# Altium footprint library JLC.PcbLib: 10 footprints
Each footprint in its own frame and in the unit in brackets; x right, y up, seen from the top. Pads: shape width x height; smd on the part's side, far side on the other; paste and mask are expansions set on the pad; w line width, h text height; cw(c..) or ccw(c..) is an arc to the next point about the centre after c.
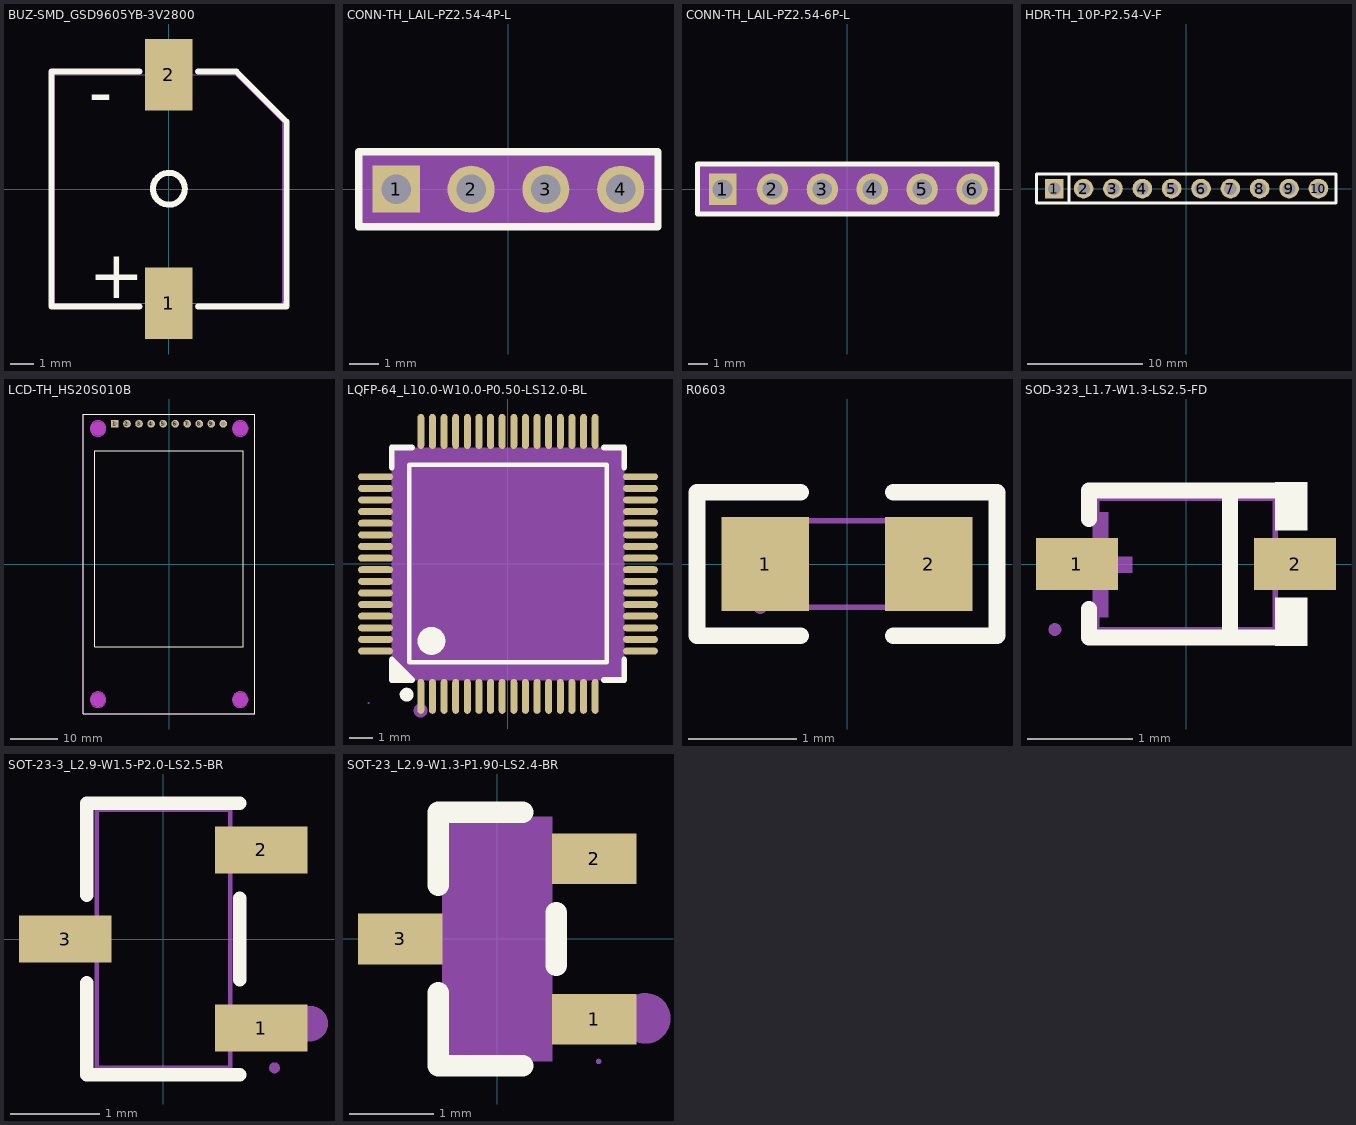
[diagram p0: the footprints below, top view; thin cyan lines are the x and y axes]

## BUZ-SMD_GSD9605YB-3V2800 [mm]
pads (2):
  rect 2x3 smd: 1(0,-4.8) 2(0,4.8)
Top Overlay:
  circle w0.254: c0.01,0.01 r0.669
  lines w0.254: -4.92,4.91 -4.92,-4.94 -1.231,-4.94 ; -4.91,4.93 -1.231,4.93 ; 1.231,-4.94 4.95,-4.94 4.95,2.83 2.85,4.93 1.231,4.93
  text "+" at -3.36,-4.59 h2.03
  text "-" at -3.36,3.08 h2.03
Mechanical 2:
  region: -0.915,-4.705 0.895,-4.705 0.895,-4.875 -0.915,-4.875
  region: -0.095,-5.715 -0.095,-3.905 0.075,-3.905 0.075,-5.715
  region: -0.915,4.895 0.895,4.895 0.895,4.725 -0.915,4.725
Mechanical 6:
  lines w0.051: -4.8,-4.8 -4.8,4.8 2.8,4.8 4.8,2.8 4.8,-4.8 -4.8,-4.8
Mechanical 8:
  region: 4.86,-4.8 4.86,-4.805 4.859,-4.814 4.856,-4.823 4.851,-4.832 4.846,-4.839 4.839,-4.846 4.832,-4.851 4.823,-4.856 4.814,-4.859 4.805,-4.86 4.795,-4.86 4.786,-4.859 4.777,-4.856 4.769,-4.851 4.761,-4.846 4.754,-4.839 4.749,-4.832 4.745,-4.823 4.742,-4.814 4.74,-4.805 4.74,-4.8 4.74,-4.795 4.742,-4.786 4.745,-4.777 4.749,-4.769 4.754,-4.761 4.761,-4.754 4.769,-4.749 4.777,-4.745 4.786,-4.742 4.795,-4.74 4.805,-4.74 4.814,-4.742 4.823,-4.745 4.832,-4.749 4.839,-4.754 4.846,-4.761 4.851,-4.769 4.856,-4.777 4.859,-4.786 4.86,-4.795 4.86,-4.8
Mechanical 9:
  region: -0.75,-5.15 -0.75,-3.65 0.75,-3.65 0.75,-5.15
  region: 0.75,5.15 0.75,3.65 -0.75,3.65 -0.75,5.15

## CONN-TH_LAIL-PZ2.54-4P-L [mm]
pads (4):
  rect 1.6x1.6 hole 1 paste-2539.97 mask+0.051: 1(-3.81,0)
  round 1.6 hole 1 paste-2539.97 mask+0.051: 2(-1.27,0) 3(1.27,0) 4(3.81,0)
Top Overlay:
  lines w0.254: -5.08,-1.27 -5.08,1.27 5.08,1.27 5.08,-1.27 -5.08,-1.27
Mechanical 9:
  region: -5.08,-1.25 -5.08,1.25 5.08,1.25 5.08,-1.25
Mechanical 11:
  region: -5.05,1.25 -5.05,1.247 -5.051,1.241 -5.053,1.236 -5.057,1.231 -5.061,1.227 -5.066,1.223 -5.071,1.221 -5.077,1.22 -5.083,1.22 -5.089,1.221 -5.094,1.223 -5.099,1.227 -5.103,1.231 -5.106,1.236 -5.109,1.241 -5.11,1.247 -5.11,1.25 -5.11,1.253 -5.109,1.259 -5.106,1.264 -5.103,1.269 -5.099,1.273 -5.094,1.277 -5.089,1.279 -5.083,1.28 -5.077,1.28 -5.071,1.279 -5.066,1.277 -5.061,1.273 -5.057,1.269 -5.053,1.264 -5.051,1.259 -5.05,1.253 -5.05,1.25
Mechanical 12:
  region: 3.49,0.32 4.13,0.32 4.13,-0.32 3.49,-0.32
  region: 0.95,0.32 1.59,0.32 1.59,-0.32 0.95,-0.32
  region: -1.59,0.32 -0.95,0.32 -0.95,-0.32 -1.59,-0.32
  region: -4.13,0.32 -3.49,0.32 -3.49,-0.32 -4.13,-0.32

## CONN-TH_LAIL-PZ2.54-6P-L [mm]
pads (6):
  rect 1.4x1.6 hole 1 paste-2539.97 mask+0.05: 1(-6.35,0)
  round 1.6 hole 1 paste-2539.97 mask+0.05: 2(-3.81,0) 3(-1.27,0) 4(1.27,0) 5(3.81,0) 6(6.35,0)
Top Overlay:
  lines w0.254: -7.62,-1.27 7.62,-1.27 7.62,1.27 -7.62,1.27 -7.62,-1.27
Mechanical 9:
  region: -7.62,-1.25 -7.62,1.25 7.62,1.25 7.62,-1.25
Mechanical 11:
  region: -7.59,1.25 -7.599,1.271 -7.62,1.28 -7.641,1.271 -7.65,1.25 -7.641,1.229 -7.62,1.22 -7.599,1.229
Mechanical 12:
  region: 6.03,0.32 6.67,0.32 6.67,-0.32 6.03,-0.32
  region: 3.49,0.32 4.13,0.32 4.13,-0.32 3.49,-0.32
  region: 0.95,0.32 1.59,0.32 1.59,-0.32 0.95,-0.32
  region: -1.59,0.32 -0.95,0.32 -0.95,-0.32 -1.59,-0.32
  region: -4.13,0.32 -3.49,0.32 -3.49,-0.32 -4.13,-0.32
  region: -6.67,0.32 -6.03,0.32 -6.03,-0.32 -6.67,-0.32

## HDR-TH_10P-P2.54-V-F [mm]
pads (10):
  rect 1.575x1.7 hole 1.1: 1(-11.43,0)
  round 1.7 hole 1.1: 2(-8.89,0) 3(-6.35,0) 4(-3.81,0) 5(-1.27,0) 6(1.27,0) 7(3.81,0) 8(6.35,0) 9(8.89,0) 10(11.43,0)
Top Overlay:
  lines w0.254: -10.16,-1.25 -10.16,1.25 ; -12.95,-1.25 12.95,-1.25 12.95,1.25 -12.95,1.25 -12.95,-1.25
Mechanical 6:
  lines w0.051: -12.95,-1.25 -12.95,1.25 12.95,1.25 12.95,-1.25 -12.95,-1.25
Mechanical 8:
  region: -12.89,-1.25 -12.89,-1.255 -12.891,-1.264 -12.894,-1.273 -12.899,-1.281 -12.904,-1.289 -12.911,-1.296 -12.919,-1.301 -12.927,-1.306 -12.936,-1.309 -12.945,-1.31 -12.955,-1.31 -12.964,-1.309 -12.973,-1.306 -12.981,-1.301 -12.989,-1.296 -12.996,-1.289 -13.001,-1.281 -13.006,-1.273 -13.008,-1.264 -13.01,-1.255 -13.01,-1.25 -13.01,-1.245 -13.008,-1.236 -13.006,-1.227 -13.001,-1.219 -12.996,-1.211 -12.989,-1.204 -12.981,-1.199 -12.973,-1.194 -12.964,-1.191 -12.955,-1.19 -12.945,-1.19 -12.936,-1.191 -12.927,-1.194 -12.919,-1.199 -12.911,-1.204 -12.904,-1.211 -12.899,-1.219 -12.894,-1.227 -12.891,-1.236 -12.89,-1.245 -12.89,-1.25
Mechanical 9:
  region: -11.75,-0.2 -11.75,0.2 -11.11,0.2 -11.11,-0.2
  region: -9.21,0.2 -8.57,0.2 -8.57,-0.2 -9.21,-0.2
  region: -6.67,0.2 -6.03,0.2 -6.03,-0.2 -6.67,-0.2
  region: -4.13,0.2 -3.49,0.2 -3.49,-0.2 -4.13,-0.2
  region: -1.59,0.2 -0.95,0.2 -0.95,-0.2 -1.59,-0.2
  region: 0.95,0.2 1.59,0.2 1.59,-0.2 0.95,-0.2
  region: 3.49,0.2 4.13,0.2 4.13,-0.2 3.49,-0.2
  region: 6.03,0.2 6.67,0.2 6.67,-0.2 6.03,-0.2
  region: 8.57,0.2 9.21,0.2 9.21,-0.2 8.57,-0.2
  region: 11.11,0.2 11.75,0.2 11.75,-0.2 11.11,-0.2

## LCD-TH_HS20S010B [mm]
pads (10):
  rect 1.6x1.6 hole 1: 1(-11.43,29.6)
  round 1.6 hole 1: 2(-8.89,29.6) 3(-6.35,29.6) 4(-3.81,29.6) 5(-1.27,29.6) 6(1.27,29.6) 7(3.81,29.6) 8(6.35,29.6) 9(8.89,29.6) 10(11.43,29.6)
Top Overlay:
  lines w0.254: -18.1,-31.623 18.1,-31.623 18.1,31.623 -18.1,31.623 -18.1,-31.623 ; -15.675,-17.487 -15.675,23.863 15.675,23.863 15.675,-17.487 -15.675,-17.487
Keep-Out Layer:
  drawing of 4 lines, arcs and shapes, not listed
Keep-Out Layer:
  drawing of 12 lines, arcs and shapes, not listed
Mechanical 1:
  circle w0.003: c-15,-28.6 r1.65
  circle w0.003: c15,-28.6 r1.65
  circle w0.003: c15,28.6 r1.65
  circle w0.003: c-15,28.6 r1.65
Mechanical 2:
  circle w1.5: c15,-28.6 r0.75
  circle w1.5: c-15,-28.6 r0.75
  circle w1.5: c-15,28.6 r0.75
  circle w1.5: c15,28.6 r0.75
Mechanical 6:
  lines w0.051: -18.1,-31.6 18.1,-31.6 18.1,31.6 -18.1,31.6 -18.1,-31.6
Mechanical 8:
  region: -18.04,31.6 -18.04,31.595 -18.041,31.586 -18.044,31.577 -18.049,31.568 -18.054,31.561 -18.061,31.554 -18.068,31.549 -18.077,31.544 -18.086,31.541 -18.095,31.54 -18.105,31.54 -18.114,31.541 -18.123,31.544 -18.131,31.549 -18.139,31.554 -18.146,31.561 -18.151,31.568 -18.156,31.577 -18.158,31.586 -18.16,31.595 -18.16,31.6 -18.16,31.605 -18.158,31.614 -18.156,31.623 -18.151,31.631 -18.146,31.639 -18.139,31.646 -18.131,31.651 -18.123,31.656 -18.114,31.658 -18.105,31.66 -18.095,31.66 -18.086,31.658 -18.077,31.656 -18.068,31.651 -18.061,31.646 -18.054,31.639 -18.049,31.631 -18.044,31.623 -18.041,31.614 -18.04,31.605 -18.04,31.6
Mechanical 9:
  drawing of 10 lines, arcs and shapes, not listed

## LQFP-64_L10.0-W10.0-P0.50-LS12.0-BL [mm]
pads (64):
  oval 0.3x1.5 smd paste+0 mask+0.051: 1(-3.75,-5.7) 2(-3.25,-5.7) 3(-2.75,-5.7) 4(-2.25,-5.7) 5(-1.75,-5.7) 6(-1.25,-5.7) 7(-0.75,-5.7) 8(-0.25,-5.7) 9(0.25,-5.7) 10(0.75,-5.7) 11(1.25,-5.7) 12(1.75,-5.7) 13(2.25,-5.7) 14(2.75,-5.7) 15(3.25,-5.7) 16(3.75,-5.7) 33(3.75,5.7) 34(3.25,5.7) 35(2.75,5.7) 36(2.25,5.7) 37(1.75,5.7) 38(1.25,5.7) 39(0.75,5.7) 40(0.25,5.7) 41(-0.25,5.7) 42(-0.75,5.7) 43(-1.25,5.7) 44(-1.75,5.7) 45(-2.25,5.7) 46(-2.75,5.7) 47(-3.25,5.7) 48(-3.75,5.7)
  oval 1.5x0.3 smd paste+0 mask+0.051: 17(5.7,-3.75) 18(5.7,-3.25) 19(5.7,-2.75) 20(5.7,-2.25) 21(5.7,-1.75) 22(5.7,-1.25) 23(5.7,-0.75) 24(5.7,-0.25) 25(5.7,0.25) 26(5.7,0.75) 27(5.7,1.25) 28(5.7,1.75) 29(5.7,2.25) 30(5.7,2.75) 31(5.7,3.25) 32(5.7,3.75) 49(-5.7,3.75) 50(-5.7,3.25) 51(-5.7,2.75) 52(-5.7,2.25) 53(-5.7,1.75) 54(-5.7,1.25) 55(-5.7,0.75) 56(-5.7,0.25) 57(-5.7,-0.25) 58(-5.7,-0.75) 59(-5.7,-1.25) 60(-5.7,-1.75) 61(-5.7,-2.25) 62(-5.7,-2.75) 63(-5.7,-3.25) 64(-5.7,-3.75)
Top Overlay:
  region: -4.131,-4.988 -5,-4.119 -5,-4.988
  lines w0.2: -4.25,-4.238 4.25,-4.238 4.25,4.262 -4.25,4.262 -4.25,-4.238
  lines w0.254: -5,4.143 -5,5.012 -4.131,5.012 ; 4.131,-4.988 5,-4.988 5,-4.119 ; 4.131,5.012 5,5.012 5,4.143 ; -5,-4.988 -5,-4.119 -4.131,-4.988 -5,-4.988
  lines w0.3: -4.361,-5.478 ccw(c-4.36,-5.628) -4.359,-5.478
  lines w0.6: -3.299,-3.013 ccw(c-3.297,-3.313) -3.294,-3.013
Mechanical 5:
  circle w0.3: c-3.76,-6.308 r0.15
Mechanical 9:
  region: -5,5 5,5 5,-5 -5,-5
Mechanical 10:
  drawing of 64 lines, arcs and shapes, not listed
Mechanical 11:
  region: -5.97,-5.988 -5.97,-5.991 -5.971,-5.997 -5.973,-6.002 -5.977,-6.007 -5.981,-6.011 -5.986,-6.015 -5.991,-6.017 -5.997,-6.018 -6.003,-6.018 -6.009,-6.017 -6.014,-6.015 -6.019,-6.011 -6.023,-6.007 -6.027,-6.002 -6.029,-5.997 -6.03,-5.991 -6.03,-5.988 -6.03,-5.985 -6.029,-5.979 -6.027,-5.974 -6.023,-5.969 -6.019,-5.965 -6.014,-5.962 -6.009,-5.959 -6.003,-5.958 -5.997,-5.958 -5.991,-5.959 -5.986,-5.962 -5.981,-5.965 -5.977,-5.969 -5.973,-5.974 -5.971,-5.979 -5.97,-5.985 -5.97,-5.988
Mechanical 12:
  drawing of 64 lines, arcs and shapes, not listed

## R0603 [mm]
pads (2):
  rect 0.806x0.864 smd paste-100 mask+0.051: 1(-0.753,0) 2(0.753,0)
Top Overlay:
  lines w0.152: -0.426,-0.661 -1.385,-0.661 -1.385,0.661 -0.426,0.661 ; 0.426,-0.661 1.385,-0.661 1.385,0.661 0.426,0.661
Top Paste:
  region: -1.195,-0.45 -0.395,-0.45 -0.345,-0.4 -0.345,-0.172 -0.715,-0.172 -0.715,0.158 -0.345,0.158 -0.345,0.4 -0.395,0.45 -1.195,0.45 -1.245,0.4 -1.245,-0.4
  region: 1.195,0.45 0.395,0.45 0.345,0.4 0.345,0.172 0.715,0.172 0.715,-0.158 0.345,-0.158 0.345,-0.4 0.395,-0.45 1.195,-0.45 1.245,-0.4 1.245,0.4
Mechanical 6:
  lines w0.051: -0.8,-0.4 0.8,-0.4 0.8,0.4 -0.8,0.4 -0.8,-0.4
Mechanical 8:
  region: -0.74,-0.4 -0.74,-0.405 -0.742,-0.414 -0.745,-0.423 -0.749,-0.431 -0.754,-0.439 -0.761,-0.446 -0.769,-0.451 -0.777,-0.456 -0.786,-0.459 -0.795,-0.46 -0.805,-0.46 -0.814,-0.459 -0.823,-0.456 -0.832,-0.451 -0.839,-0.446 -0.846,-0.439 -0.851,-0.431 -0.856,-0.423 -0.859,-0.414 -0.86,-0.405 -0.86,-0.4 -0.86,-0.395 -0.859,-0.386 -0.856,-0.377 -0.851,-0.369 -0.846,-0.361 -0.839,-0.354 -0.832,-0.349 -0.823,-0.344 -0.814,-0.342 -0.805,-0.34 -0.795,-0.34 -0.786,-0.342 -0.777,-0.344 -0.769,-0.349 -0.761,-0.354 -0.754,-0.361 -0.749,-0.369 -0.745,-0.377 -0.742,-0.386 -0.74,-0.395 -0.74,-0.4
Mechanical 9:
  region: 0.8,-0.4 0.8,0.4 0.5,0.4 0.5,-0.4
  region: -0.8,-0.4 -0.8,0.4 -0.5,0.4 -0.5,-0.4

## SOD-323_L1.7-W1.3-LS2.5-FD [mm]
pads (2):
  rect 0.78x0.5 smd: 1(-1.04,0) 2(1.04,0)
Top Overlay:
  region: 0.85,0.32 1.155,0.32 1.155,0.777 0.85,0.777
  region: 0.85,-0.32 1.155,-0.32 1.155,-0.777 0.85,-0.777
  lines w0.152: -0.926,-0.43 -0.926,-0.701 0.926,-0.701 ; -0.926,0.43 -0.926,0.701 0.926,0.701 ; 0.421,-0.701 0.421,0.701
Mechanical 2:
  region: -1.114,-0.083 -1.114,0.067 -0.514,0.067 -0.514,-0.083
  region: 1.316,-0.075 1.316,0.075 0.716,0.075 0.716,-0.075
  region: -0.889,-0.508 -0.889,0.492 -0.739,0.492 -0.739,-0.508
Mechanical 6:
  lines w0.051: -0.85,-0.625 0.85,-0.625 0.85,0.625 -0.85,0.625 -0.85,-0.625
Mechanical 7:
  region: -0.96,-0.16 -0.84,-0.16 -0.84,0.16 -0.96,0.16
  region: 0.96,-0.16 0.84,-0.16 0.84,0.16 0.96,0.16
Mechanical 8:
  region: -1.19,-0.625 -1.19,-0.63 -1.191,-0.639 -1.194,-0.648 -1.199,-0.657 -1.204,-0.664 -1.211,-0.671 -1.219,-0.676 -1.227,-0.681 -1.236,-0.684 -1.245,-0.685 -1.255,-0.685 -1.264,-0.684 -1.273,-0.681 -1.281,-0.676 -1.289,-0.671 -1.296,-0.664 -1.301,-0.657 -1.306,-0.648 -1.308,-0.639 -1.31,-0.63 -1.31,-0.625 -1.31,-0.62 -1.308,-0.611 -1.306,-0.602 -1.301,-0.594 -1.296,-0.586 -1.289,-0.579 -1.281,-0.574 -1.273,-0.57 -1.264,-0.567 -1.255,-0.565 -1.245,-0.565 -1.236,-0.567 -1.227,-0.57 -1.219,-0.574 -1.211,-0.579 -1.204,-0.586 -1.199,-0.594 -1.194,-0.602 -1.191,-0.611 -1.19,-0.62 -1.19,-0.625
Mechanical 9:
  region: -1.25,-0.16 -0.95,-0.16 -0.95,0.16 -1.25,0.16
  region: 1.25,-0.16 0.95,-0.16 0.95,0.16 1.25,0.16

## SOT-23-3_L2.9-W1.5-P2.0-LS2.5-BR [mm]
pads (3):
  rect 1.037x0.532 smd: 1(1.101,-1) 2(1.101,1) 3(-1.101,0)
Top Overlay:
  lines w0.152: -0.859,-0.495 -0.859,-1.526 0.859,-1.526 ; -0.859,0.495 -0.859,1.526 0.859,1.526 ; 0.859,-0.455 0.859,0.455
Mechanical 2:
  circle w0.2: c1.65,-0.95 r0.1
Mechanical 6:
  lines w0.051: -0.745,-1.448 0.755,-1.448 0.755,1.452 -0.745,1.452 -0.745,-1.448
Mechanical 7:
  region: -0.86,-0.2 -0.86,0.2 -0.74,0.2 -0.74,-0.2
  region: 0.74,0.8 0.74,1.2 0.86,1.2 0.86,0.8
  region: 0.74,-1.2 0.74,-0.8 0.86,-0.8 0.86,-1.2
Mechanical 8:
  region: 1.31,-1.448 1.31,-1.453 1.309,-1.462 1.306,-1.471 1.301,-1.479 1.296,-1.487 1.289,-1.494 1.281,-1.499 1.273,-1.503 1.264,-1.506 1.255,-1.508 1.245,-1.508 1.236,-1.506 1.227,-1.503 1.219,-1.499 1.211,-1.494 1.204,-1.487 1.199,-1.479 1.194,-1.471 1.192,-1.462 1.19,-1.453 1.19,-1.448 1.19,-1.443 1.192,-1.434 1.194,-1.425 1.199,-1.416 1.204,-1.409 1.211,-1.402 1.219,-1.397 1.227,-1.392 1.236,-1.389 1.245,-1.388 1.255,-1.388 1.264,-1.389 1.273,-1.392 1.281,-1.397 1.289,-1.402 1.296,-1.409 1.301,-1.416 1.306,-1.425 1.309,-1.434 1.31,-1.443 1.31,-1.448
Mechanical 9:
  region: -1.25,-0.2 -1.25,0.2 -0.85,0.2 -0.85,-0.2
  region: 0.85,0.8 0.85,1.2 1.25,1.2 1.25,0.8
  region: 0.85,-1.2 0.85,-0.8 1.25,-0.8 1.25,-1.2

## SOT-23_L2.9-W1.3-P1.90-LS2.4-BR [mm]
pads (3):
  rect 1x0.6 smd paste+0 mask+0.051: 1(1.15,-0.95) 2(1.15,0.95) 3(-1.15,0)
Top Overlay:
  lines w0.254: -0.7,-0.636 -0.7,-1.5 0.3,-1.5 ; -0.7,0.636 -0.7,1.5 0.3,1.5 ; 0.7,-0.314 0.7,0.314
Mechanical 5:
  circle w0.3: c1.753,-0.94 r0.15
Mechanical 9:
  region: -0.65,-1.45 -0.65,1.45 0.65,1.45 0.65,-1.45
Mechanical 10:
  region: 0.64,-1.15 0.64,-0.75 0.81,-0.75 0.81,-1.15
  region: 0.64,0.75 0.64,1.15 0.81,1.15 0.81,0.75
  region: -0.81,-0.2 -0.81,0.2 -0.64,0.2 -0.64,-0.2
Mechanical 11:
  region: 1.23,-1.45 1.23,-1.453 1.229,-1.459 1.227,-1.464 1.223,-1.469 1.219,-1.473 1.214,-1.477 1.209,-1.479 1.203,-1.48 1.197,-1.48 1.191,-1.479 1.186,-1.477 1.181,-1.473 1.177,-1.469 1.173,-1.464 1.171,-1.459 1.17,-1.453 1.17,-1.45 1.17,-1.447 1.171,-1.441 1.173,-1.436 1.177,-1.431 1.181,-1.427 1.186,-1.424 1.191,-1.421 1.197,-1.42 1.203,-1.42 1.209,-1.421 1.214,-1.424 1.219,-1.427 1.223,-1.431 1.227,-1.436 1.229,-1.441 1.23,-1.447 1.23,-1.45
Mechanical 12:
  region: 0.8,-1.15 0.8,-0.75 1.2,-0.75 1.2,-1.15
  region: 0.8,0.75 0.8,1.15 1.2,1.15 1.2,0.75
  region: -1.2,-0.2 -1.2,0.2 -0.8,0.2 -0.8,-0.2